# Altium footprint library laboE_altium.PcbLib: 676 footprints (part 31 of 43)
Each footprint in its own frame and in the unit in brackets; x right, y up, seen from the top. Pads: shape width x height; smd on the part's side, far side on the other; paste and mask are expansions set on the pad; w line width, h text height; cw(c..) or ccw(c..) is an arc to the next point about the centre after c.
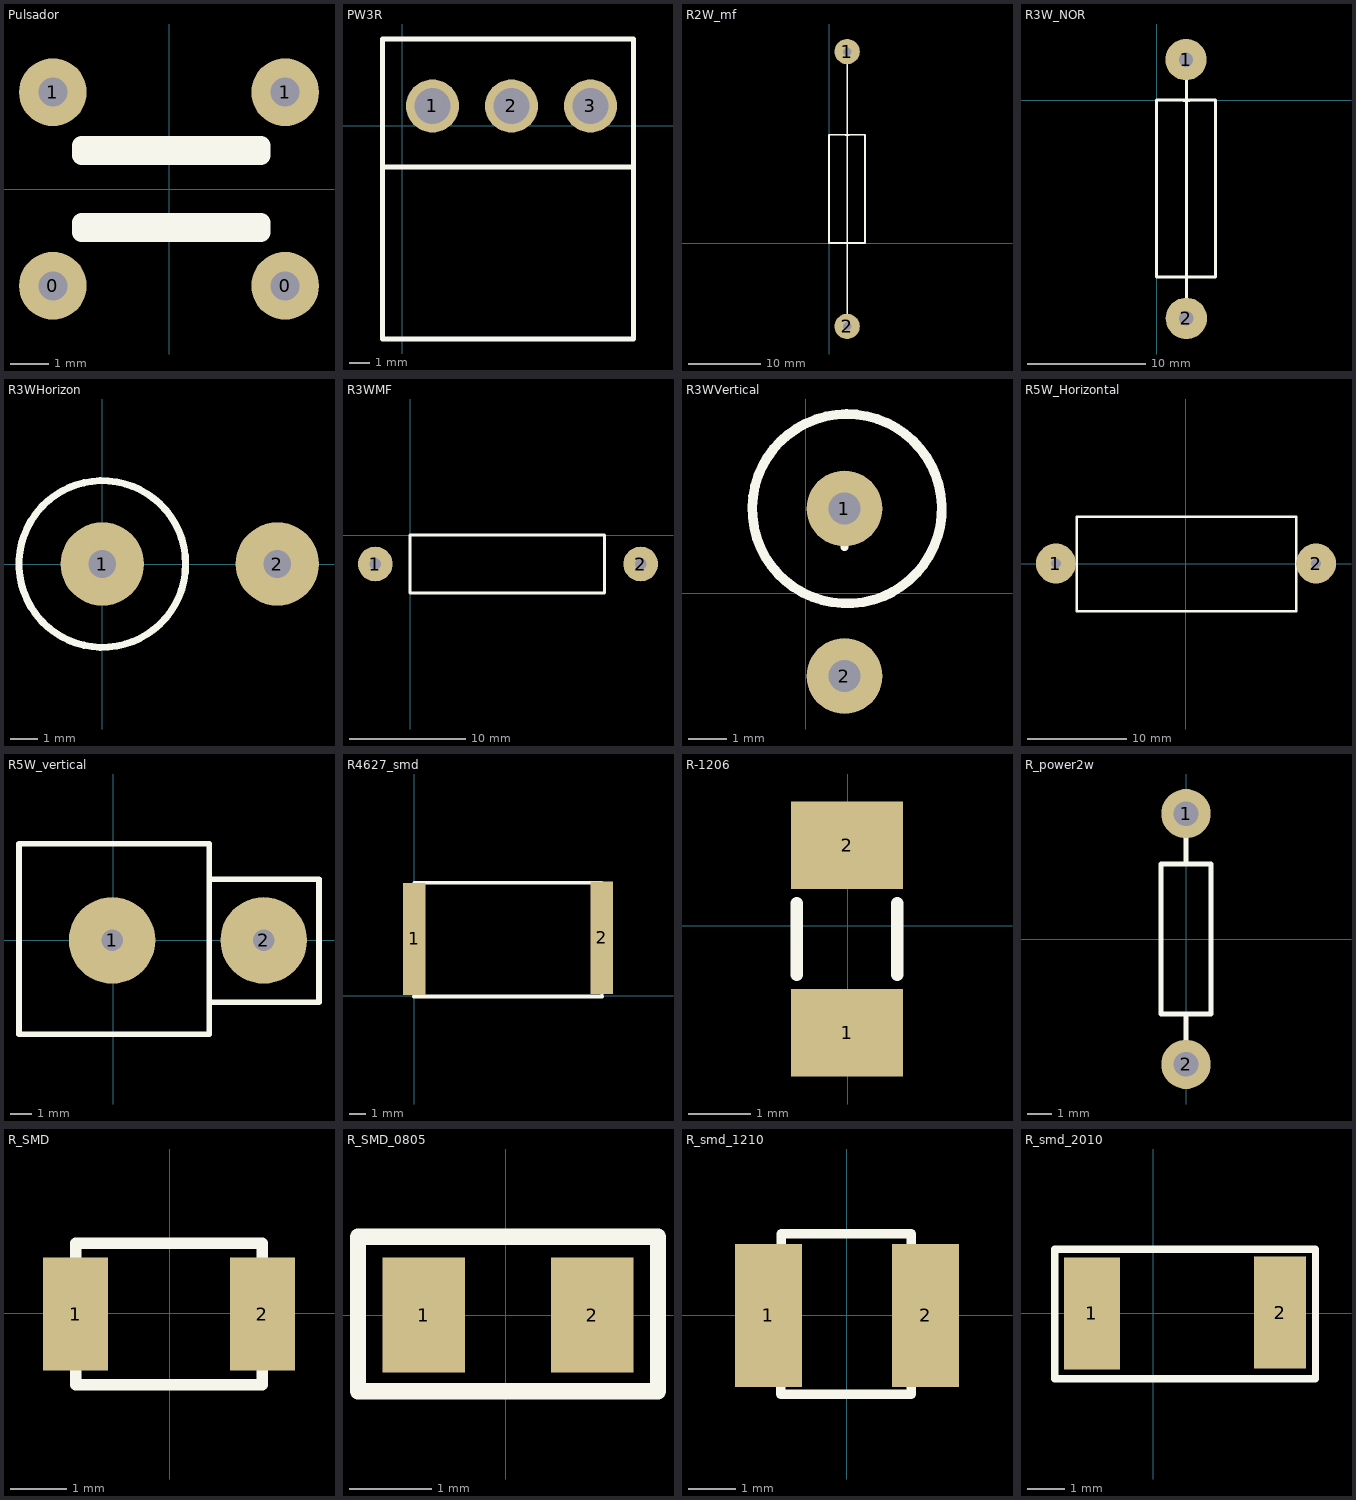
[diagram p30: the footprints below, top view; thin cyan lines are the x and y axes]

## Pulsador [mil]
pads (4):
  round 70 hole 30: 0(-120,-100) 0(120,-100) 1(-120,100) 1(120,100)
Top Overlay:
  lines w20: -90,-45 95,-45 95,-35 -90,-35 -90,-45 ; -90,35 -90,45 95,45 95,35 -90,35

## PW3R [mm]
pads (3):
  round 2.65 hole 1.8: 1(1.5,1) 2(5.45,1) 3(9.4,1)
Top Overlay:
  lines w0.254: -1,4.3 -1,4.35 ; -1,-2.05 11.55,-2.05 11.55,4.35 ; -1,-2.05 -1,4.35 ; -1,-2.05 -1,-10.65 11.55,-10.65 11.55,4.35 ; -1,4.35 11.55,4.35

## R2W_mf [mm]
pads (2):
  round 3.5 hole 1.2: 1(2.515,26.492) 2(2.515,-11.532)
Top Overlay:
  lines w0.254: 2.261,14.961 2.769,14.961 ; 2.515,-11.532 2.515,0 2.515,26.492 ; 2.515,14.707 2.515,15.215 ; 0,0 4.978,0 4.978,14.986 0,14.986 0,13.614 0,0
3D body: height 6, standoff 1, extent 0.015,0 5.015,15
3D body: height 4, standoff 3, extent 2.057,-11.074 3.055,26.926
3D body: height 6.1, standoff 0.9, extent -0.127,0.741 5.072,1.241
3D body: height 6.1, standoff 0.9, extent -0.127,1.63 5.072,2.13
3D body: height 6.1, standoff 0.9, extent -0.144,2.823 5.055,3.323
3D body: height 6.1, standoff 0.9, extent -0.093,6.1 5.105,6.6

## R3W_NOR [mm]
pads (2):
  round 3.5 hole 1.2: 1(2.489,3.429) 2(2.515,-18.466)
Top Overlay:
  lines w0.254: 2.261,-0.025 2.769,-0.025 ; 2.515,-18.466 2.515,-14.986 2.515,3.429 ; 2.515,-0.279 2.515,0.229 ; 0,-14.986 4.978,-14.986 4.978,0 0,0 0,-1.372 0,-14.986
3D body: height 6, standoff 1, extent 0.015,-14.986 5.015,0.014
3D body: height 4, standoff 3, extent 2.016,-18.466 3.014,3.534
3D body: height 6.1, standoff 0.9, extent -0.127,-14.245 5.072,-13.745
3D body: height 6.1, standoff 0.9, extent -0.127,-13.356 5.072,-12.856
3D body: height 6.1, standoff 0.9, extent -0.144,-12.163 5.055,-11.663
3D body: height 6.1, standoff 0.9, extent -0.093,-8.886 5.105,-8.386

## R3WHorizon [mm]
pads (2):
  round 3 hole 1: 1(0,0) 2(6.3,0)
Top Overlay:
  circle w0.254: c0,0 r3
3D body: height 12, standoff 0, extent 5.802,-0.498 6.8,0.498
3D body: height 2.5, standoff 0, extent -0.496,-0.499 0.5,0.499
3D body: height 12, standoff 11, extent 2.2,-0.498 6.2,0.5
3D body: height 12.5, standoff 0.5, extent -2.994,-2.976 2.994,3

## R3WMF [mm]
pads (2):
  round 3 hole 1: 1(-3,-2.5) 2(19.9,-2.5)
Top Overlay:
  lines w0.254: 0,-5 0,0 16.8,0 16.8,-5 0,-5
3D body: height 4.98, standoff 0, extent 0.1,-5.195 16.8,-0.205
3D body: height 3, standoff 2, extent -3,-2.999 0,-2.001
3D body: height 3, standoff 2, extent 16.9,-2.999 19.9,-2.001
3D body: height 2.5, standoff 0, extent 19.404,-2.999 20.4,-2.001
3D body: height 2.5, standoff 0, extent -3.496,-2.999 -2.5,-2.001

## R3WVertical [mm]
pads (2):
  round 2 hole 0.85: 1(1.016,2.235) 2(1.016,-2.184)
Top Overlay:
  lines w0.2: 1.016,1.219 1.016,2.235
  lines w0.254: 3.581,2.311 ccw(c1.083,2.229) 3.581,2.311
3D body: height 7.4, standoff 6, extent 0.616,1.836 1.416,2.635
3D body: height 17.9, standoff 17.1, extent 0.67,-2.612 1.467,2.388
3D body: height 18, standoff 0, extent 0.619,-2.583 1.416,-1.785
3D body: height 15, standoff 0, extent -1.464,-0.26 3.516,4.73

## R5W_Horizontal [mm]
pads (2):
  round 4 hole 1: 1(-13.05,0) 2(13.05,0)
Top Overlay:
  lines w0.254: -10.95,-4.8 -10.95,4.7 11.05,4.7 11.05,-4.8 -10.95,-4.8
3D body: height 11, standoff 1, extent -10.95,-4.8 11.05,4.7
3D body: height 6, standoff 0, extent -14.042,-0.998 -12.05,0.998
3D body: height 6, standoff 0, extent 12.058,-0.998 14.05,0.998
3D body: height 5.99, standoff 4, extent -13.05,-0.996 -10.05,1
3D body: height 5.99, standoff 4, extent 10.15,-0.696 13.15,1.3

## R5W_vertical [mm]
pads (2):
  round 4 hole 1: 1(-0.05,0) 2(6.95,0)
Top Overlay:
  lines w0.254: 4.475,-2.85 9.5,-2.85 9.5,2.825 4.425,2.825 4.425,4.45 ; 4.425,4.45 -4.35,4.45 -4.35,-4.325 4.425,-4.325 4.425,4.45
3D body: height 24, standoff 22, extent -1,-1 8,0.998
3D body: height 24, standoff 0, extent 5.958,-0.998 7.95,0.998
3D body: height 23, standoff 0.2, extent -4.075,-4.25 4.1,4.2

## R4627_smd [mm]
pads (2):
  rect 1.4x7 smd: 1(-0.008,3.556) 2(11.709,3.632)
Top Overlay:
  lines w0.2: -0.008,-0.025 -0.008,7.061 11.709,7.061 11.709,0.034
  lines w0.254: -0.008,-0.025 11.709,-0.025
3D body: height 1, standoff 0, extent -0.226,0.104 0.074,7.059
3D body: height 2, standoff 0, extent 0.011,-0.045 11.709,7.061
3D body: height 1, standoff 0, extent 11.661,0.104 11.961,7.059

## R-1206 [mm]
pads (2):
  rect 1.8x1.4 smd: 1(-0.008,-1.709) 2(-0.008,1.291)
Top Overlay:
  lines w0.2: -0.808,-0.784 -0.808,0.366 ; 0.792,-0.784 0.792,0.366
3D body: height 0.55, standoff 0, extent -0.758,-1.834 0.742,1.291
3D body: height 0.56, standoff 0.55, extent -0.758,-1.209 0.742,0.791

## R_power2w [mm]
pads (2):
  round 2 hole 1: 1(0,5.08) 2(0,-5.08)
Top Overlay:
  lines w0.2: 0,-4.064 0,-3.048 ; 0,3.048 0,4.064 ; -1.016,-3.048 1.016,-3.048 1.016,3.048 -1.016,3.048 -1.016,-3.048
3D body: height 1.1, standoff 0.3, extent -0.419,-5.089 0.381,-3.089
3D body: height 1, standoff 0, extent -0.3,-5.38 0.3,-4.78
3D body: height 1, standoff 0, extent -0.3,4.78 0.3,5.38
3D body: height 1.1, standoff 0.3, extent -0.381,3.099 0.419,5.099
3D body: height 1.8, standoff -0.4, extent -1.075,-2.997 1.125,3.003

## R_SMD [mm]
pads (2):
  rect 1.15x2 smd: 1(-1.66,-0.01) 2(1.64,-0.01)
Top Overlay:
  lines w0.2: -1.66,-1.26 -1.66,-0.01 -1.66,1.24 1.64,1.24 1.64,-1.26 -1.66,-1.26
3D body: height 1, standoff 0, extent -1.3,-0.8 1.3,0.8
3D body: height 1, standoff 0, extent -1.6,-0.8 -1.3,0.8
3D body: height 1, standoff 0, extent 1.3,-0.8 1.6,0.8

## R_SMD_0805 [mm]
pads (2):
  rect 1x1.4 smd: 1(-1,0) 2(1.05,0)
Top Overlay:
  lines w0.2: -1.8,-0.925 -1.8,0.95 1.85,0.95 1.85,-0.925 -1.8,-0.925
3D body: height 1, standoff 0, extent 0.75,-0.612 1.05,0.613
3D body: height 1, standoff 0, extent -1,-0.612 -0.7,0.613
3D body: height 1, standoff 0, extent -0.7,-0.612 0.75,0.613

## R_smd_1210 [mm]
pads (2):
  rect 1.4x3 smd: 1(-1.65,0) 2(1.65,0)
Top Overlay:
  lines w0.2: -1.39,-1.66 -1.38,0 -1.38,1.72 1.35,1.72 1.35,-1.65 -1.39,-1.66
3D body: height 1, standoff 0, extent -1.3,-1.54 1.3,1.59
3D body: height 1, standoff 0, extent -1.6,-1.54 -1.3,1.59
3D body: height 1, standoff 0, extent 1.3,-1.54 1.6,1.59

## R_smd_2010 [mm]
pads (2):
  rect 1.5x3 smd: 1(-1.65,0)
  rect 1.4x3 smd: 2(3.4,0.025)
Top Overlay:
  lines w0.2: -2.65,-1.75 4.35,-1.75 4.35,1.72 -2.65,1.72 -2.65,-1.75
3D body: height 1, standoff 0, extent 2.75,-1.25 3.4,1.25
3D body: height 1, standoff 0, extent -1.6,-1.25 -0.95,1.25
3D body: height 1, standoff 0, extent -0.95,-1.25 2.75,1.25